# Altium footprint library Components - 26.10.26 - 02.19.PcbLib: 1 footprints
Each footprint in its own frame and in the unit in brackets; x right, y up, seen from the top. Pads: shape width x height; smd on the part's side, far side on the other; paste and mask are expansions set on the pad; w line width, h text height; cw(c..) or ccw(c..) is an arc to the next point about the centre after c.
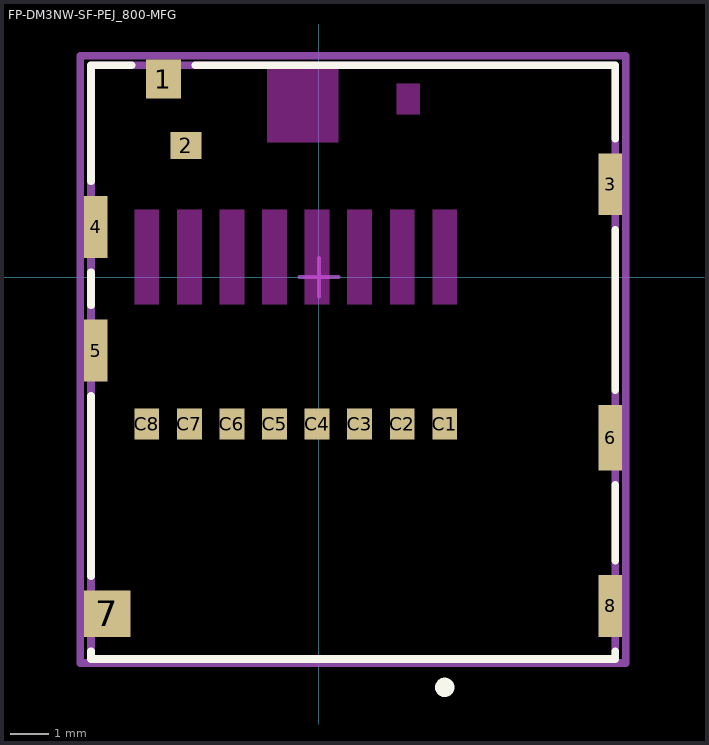
[diagram p0: the footprint, top view; thin cyan lines are the x and y axes]

## FP-DM3NW-SF-PEJ_800-MFG [mm]
pads (16):
  rect 0.9x1 smd paste+0 mask+0: 1(-4.02,5.12)
  rect 0.8x0.7 smd paste+0 mask+0: 2(-3.44,3.4)
  rect 0.6x1.6 smd paste+0 mask+0: 3(7.53,2.4) 4(-5.77,1.3) 5(-5.77,-1.9) 8(7.53,-8.5)
  rect 0.6x1.7 smd paste+0 mask+0: 6(7.53,-4.15)
  rect 1.2x1.2 smd paste+0 mask+0: 7(-5.47,-8.7)
  rect 0.64x0.8 smd paste+0 mask+0: C1(3.25,-3.8) C2(2.15,-3.8) C3(1.05,-3.8) C4(-0.05,-3.8) C5(-1.15,-3.8) C6(-2.25,-3.8) C7(-3.35,-3.8) C8(-4.45,-3.8)
Top Overlay:
  circle w0.25: c3.25,-10.605 r0.125
  lines w0.2: -5.895,-9.675 -5.895,-9.875 7.655,-9.875 7.655,-9.675 ; -5.895,-7.725 -5.895,-3.075 ; -5.895,-0.725 -5.895,0.125 ; -5.895,2.475 -5.895,5.475 -4.845,5.475 ; -3.195,5.475 7.655,5.475 7.655,3.575 ; 7.655,-7.325 7.655,-5.375 ; 7.655,-2.925 7.655,1.225
Keep-Out Layer:
  rectangle: 2.01,4.2 2.61,5
  rectangle: -1.35,3.48 0.51,5.48
  rectangle: 2.93,-0.705 3.57,1.745
  rectangle: 1.83,-0.705 2.47,1.745
  rectangle: 0.73,-0.705 1.37,1.745
  rectangle: -0.37,-0.705 0.27,1.745
  rectangle: -1.47,-0.705 -0.83,1.745
  rectangle: -2.57,-0.705 -1.93,1.745
  rectangle: -3.67,-0.705 -3.03,1.745
  rectangle: -4.77,-0.705 -4.13,1.745
Top Assembly:
  lines w0.2: -6.17,-9.975 -6.17,5.72 7.93,5.72 7.93,-9.975 -6.17,-9.975
  text ".Designator" at 0.88,-1.94 h1
Top 3D Body:
  lines w0.2: -5.895,-9.875 -5.895,5.475 7.655,5.475 7.655,-9.875 -5.895,-9.875
Top Courtyard:
  lines w0.2: -6.17,-9.975 -6.17,5.72 7.93,5.72 7.93,-9.975 -6.17,-9.975
Top Component Center:
  lines w0.1: -0.5,0 0.5,0 ; 0,-0.5 0,0.5
3D body "Conn_Hirose_Electric_Co_Ltd_DM3NW-SF-PEJ_800_eec.STEP": height 0.25, standoff 0, extent -6.17,-9.975 7.93,5.72